# Altium footprint library ISC-nRF52840-A-MODULE.PcbLib: 1 footprints
Each footprint in its own frame and in the unit in brackets; x right, y up, seen from the top. Pads: shape width x height; smd on the part's side, far side on the other; paste and mask are expansions set on the pad; w line width, h text height; cw(c..) or ccw(c..) is an arc to the next point about the centre after c.
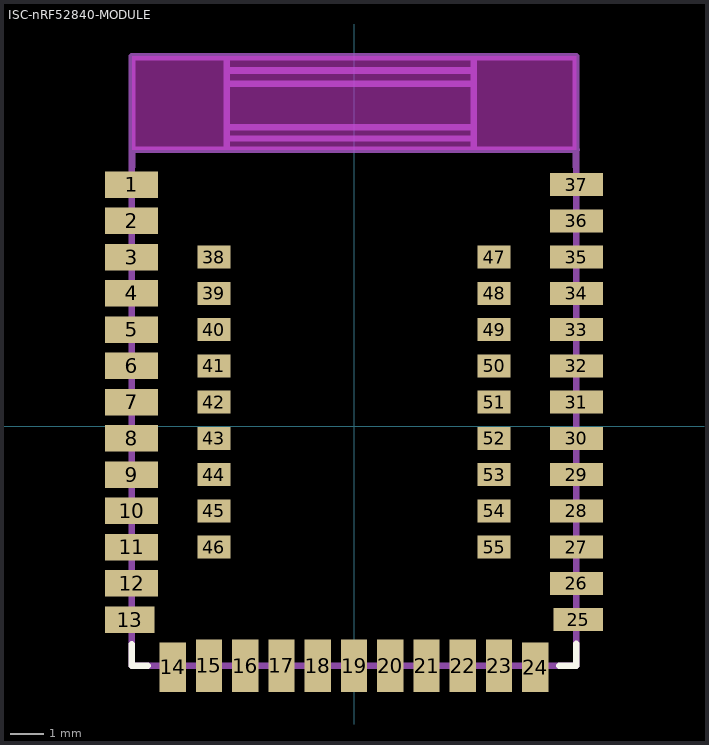
[diagram p0: the footprint, top view; thin cyan lines are the x and y axes]

## ISC-nRF52840-MODULE [mm]
pads (55):
  rect 1.6x0.8 smd mask+0.05: 1(-6.75,7.325) 2(-6.75,6.225) 3(-6.75,5.125) 4(-6.75,4.025) 5(-6.75,2.925) 6(-6.75,1.825) 7(-6.75,0.725) 8(-6.75,-0.375) 9(-6.75,-1.475) 10(-6.75,-2.575) 11(-6.75,-3.675) 12(-6.75,-4.775)
  rect 1.5x0.8 smd mask+0.05: 13(-6.8,-5.875)
  rect 0.8x1.5 smd mask+0.05: 14(-5.5,-7.325) 24(5.5,-7.325)
  rect 0.8x1.6 smd mask+0.05: 15(-4.4,-7.275) 16(-3.3,-7.275) 17(-2.2,-7.275) 18(-1.1,-7.275) 19(0,-7.275) 20(1.1,-7.275) 21(2.2,-7.275) 22(3.3,-7.275) 23(4.4,-7.275)
  rect 1.5x0.7 smd mask+0.05: 25(6.8,-5.875)
  rect 1.6x0.7 smd mask+0.05: 26(6.75,-4.775) 27(6.75,-3.675) 28(6.75,-2.575) 29(6.75,-1.475) 30(6.75,-0.375) 31(6.75,0.725) 32(6.75,1.825) 33(6.75,2.925) 34(6.75,4.025) 35(6.75,5.125) 36(6.75,6.225) 37(6.75,7.325)
  rect 1x0.7 smd mask+0.05: 38(-4.25,5.125) 39(-4.25,4.025) 40(-4.25,2.925) 41(-4.25,1.825) 42(-4.25,0.725) 43(-4.25,-0.375) 44(-4.25,-1.475) 45(-4.25,-2.575) 46(-4.25,-3.675) 47(4.25,5.125) 48(4.25,4.025) 49(4.25,2.925) 50(4.25,1.825) 51(4.25,0.725) 52(4.25,-0.375) 53(4.25,-1.475) 54(4.25,-2.575) 55(4.25,-3.675)
Top Overlay:
  lines w0.2: -6.75,-6.623 -6.75,-7.275 -6.259,-7.275 ; 6.223,-7.275 6.75,-7.275 6.75,-6.604
Keep-Out Layer:
  rectangle: -6.731,8.382 6.759,11.235
PCB Cutout (Mech4):
  lines w0.2: -6.731,7.874 -6.731,11.188 6.731,11.188 6.731,7.874 ; -6.731,8.382 6.759,8.382 ; -3.867,8.382 -3.867,11.188 ; -3.867,9.069 3.633,9.069 ; -3.867,10.388 3.633,10.388 ; -3.867,10.788 3.633,10.788 ; -3.861,8.72 3.632,8.738 ; 3.633,8.382 3.633,11.188
  text "ANTENNA" at -3.277,9.271 h1.4
Top Assembly:
  lines w0.2: -6.75,-7.275 6.75,-7.275 6.75,11.225 -6.75,11.225 -6.75,-7.275
  text ".Designator" at -7.62,-0.635 h1.52
3D body "003_ISC_NRF52840_01.01.03_with pads.STEP": height -0.44, standoff -2.15, extent -6.75,-7.375 6.75,11.125